# Altium footprint library LimeMicroAltiumLib.PcbLib: 876 footprints (part 43 of 57)
Each footprint in its own frame and in the unit in brackets; x right, y up, seen from the top. Pads: shape width x height; smd on the part's side, far side on the other; paste and mask are expansions set on the pad; w line width, h text height; cw(c..) or ccw(c..) is an arc to the next point about the centre after c.
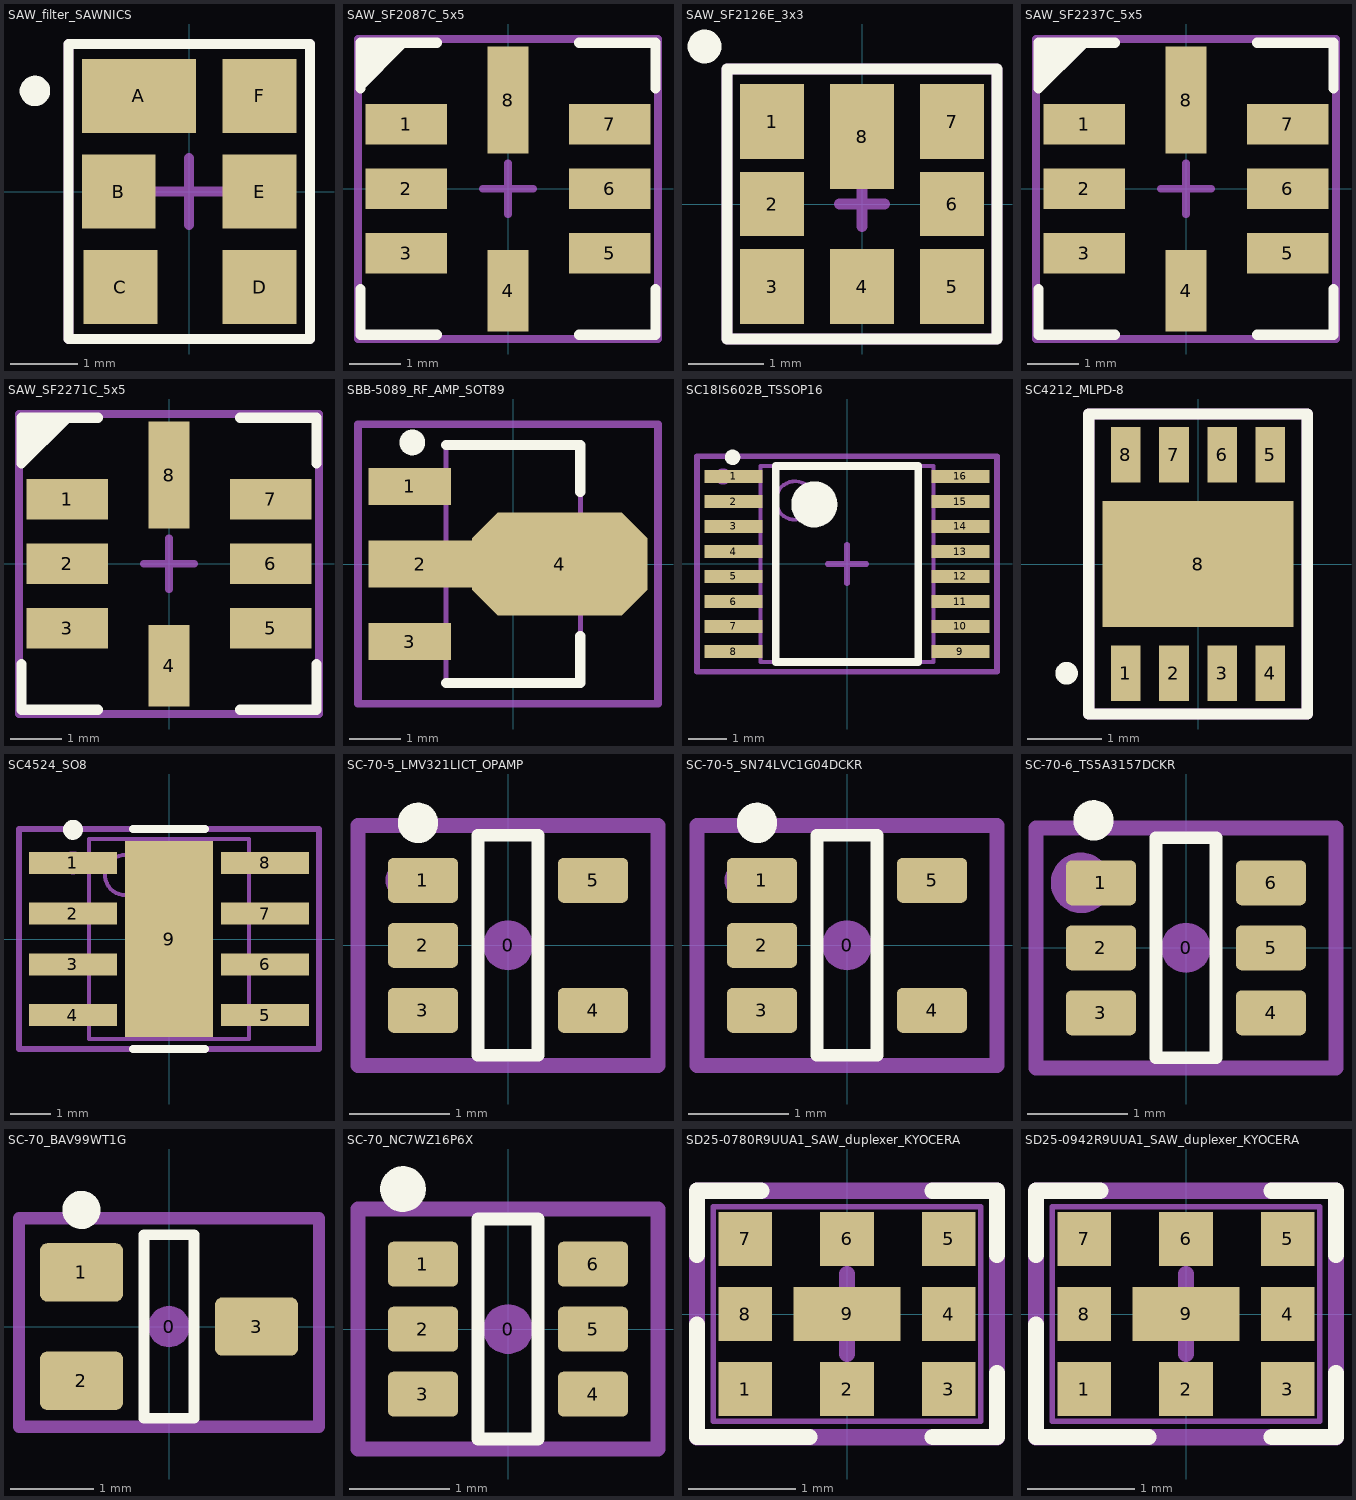
[diagram p42: the footprints below, top view; thin cyan lines are the x and y axes]

## SAW_filter_SAWNICS [mm]
pads (6):
  rect 1.7x1.1 smd: A(-0.75,1.425)
  rect 1.1x1.1 smd: B(-1.05,0) C(-1.025,-1.425) D(1.05,-1.425) E(1.05,0) F(1.05,1.425)
Top Overlay:
  circle w0.254: c-2.3,1.5 r0.1
  lines w0.15: -1.8,-2.2 1.8,-2.2 1.8,2.2 -1.8,2.2 -1.8,-2.2
Mechanical 15:
  circle w0.254: c-0.8,1.5 r0.1
  lines w0.15: -0.5,0 0,0 ; 0,-0.5 0,0 ; 0,0.5 0,0 ; 0.5,0 0,0 ; -1.8,-2.2 -1.8,2.2 1.8,2.2 1.8,-2.2 -1.8,-2.2
  text ".Designator" at 0,0 h0.55
3D body "SW3dPS-DCC6C.STEP": height 1.14, standoff -0.09, extent -1.475,-1.475 1.525,1.525

## SAW_SF2087C_5x5 [mm]
pads (8):
  rect 1.6x0.8 smd mask+0.05: 1(-2,1.27) 2(-2,0) 3(-2,-1.27) 5(2,-1.27) 6(2,0) 7(2,1.27)
  rect 0.8x1.6 smd mask+0.05: 4(0,-2.005)
  rect 0.8x2.1 smd mask+0.05: 8(0,1.745)
Top Overlay:
  region: -2.9,1.9 -2,2.8 -2,2.9 -2.87,2.9 -2.9,2.87
  lines w0.2: -2.9,-1.97 -2.9,-2.87 -1.4,-2.87 ; -2.9,1.97 -2.9,2.87 -1.4,2.87 ; 1.4,-2.87 2.9,-2.87 2.9,-1.97 ; 1.4,2.87 2.9,2.87 2.9,1.97
Mechanical 15:
  circle w0.25: c-2,1.3 r0.1
  lines w0.15: -0.5,0 0.5,0 ; 0,-0.5 0,0.5 ; -2.95,-2.955 2.95,-2.955 2.95,2.945 -2.95,2.945 -2.95,-2.955
  text ".Designator" at 0,0 h0.55
3D body "User Library-TA0731.step": height 1.7, standoff 0, extent -2.5,-2.5 2.5,2.5

## SAW_SF2126E_3x3 [mm]
pads (8):
  rect 0.85x1 smd mask+0.05: 1(-1.2,1.1) 3(-1.2,-1.1) 4(0,-1.1) 5(1.2,-1.1) 7(1.2,1.1)
  rect 0.85x0.85 smd mask+0.05: 2(-1.2,0) 6(1.2,0)
  rect 0.85x1.4 smd mask+0.05: 8(0,0.9)
Top Overlay:
  circle w0.25: c-2.1,2.1 r0.1
  lines w0.15: -1.8,-1.8 -1.8,1.8 1.8,1.8 1.8,-1.8 -1.8,-1.8
Mechanical 15:
  circle w0.25: c-1.2,1.1 r0.1
  lines w0.15: -0.3,0 0.3,0 ; 0,-0.3 0,0.3 ; -1.8,-1.8 1.8,-1.8 1.8,1.8 -1.8,1.8 -1.8,-1.8
  text ".Designator" at 0,0 h0.55
3D body: height 1.15, standoff 0, extent -1.298,0.901 -0.9,1.3
3D body: height 1.1, standoff 0, extent -1.5,-1.5 1.5,1.5

## SAW_SF2237C_5x5 [mm]
pads (8):
  rect 1.6x0.8 smd mask+0.05: 1(-2,1.27) 2(-2,0) 3(-2,-1.27) 5(2,-1.27) 6(2,0) 7(2,1.27)
  rect 0.8x1.6 smd mask+0.05: 4(0,-2.005)
  rect 0.8x2.1 smd mask+0.05: 8(0,1.745)
Top Overlay:
  region: -2.9,1.9 -2,2.8 -2,2.9 -2.87,2.9 -2.9,2.87
  lines w0.2: -2.9,-1.97 -2.9,-2.87 -1.4,-2.87 ; -2.035,2.835 -2.9,1.97 -2.9,2.87 -1.4,2.87 ; 1.4,-2.87 2.9,-2.87 2.9,-1.97 ; 1.4,2.87 2.9,2.87 2.9,1.97
Mechanical 15:
  circle w0.25: c-2,1.3 r0.1
  lines w0.15: -0.5,0 0.5,0 ; 0,-0.5 0,0.5 ; -2.95,-2.955 2.95,-2.955 2.95,2.945 -2.95,2.945 -2.95,-2.955
  text ".Designator" at 0,0 h0.55
3D body "User Library-TA0731.step": height 1.7, standoff 0, extent -2.5,-2.5 2.5,2.5

## SAW_SF2271C_5x5 [mm]
pads (8):
  rect 1.6x0.8 smd mask+0.05: 1(-2,1.27) 2(-2,0) 3(-2,-1.27) 5(2,-1.27) 6(2,0) 7(2,1.27)
  rect 0.8x1.6 smd mask+0.05: 4(0,-2.005)
  rect 0.8x2.1 smd mask+0.05: 8(0,1.745)
Top Overlay:
  region: -2.9,1.9 -2,2.8 -2,2.9 -2.87,2.9 -2.9,2.87
  lines w0.2: -2.9,-1.97 -2.9,-2.87 -1.4,-2.87 ; -2.035,2.835 -2.9,1.97 -2.9,2.87 -1.4,2.87 ; 1.4,-2.87 2.9,-2.87 2.9,-1.97 ; 1.4,2.87 2.9,2.87 2.9,1.97
Mechanical 15:
  circle w0.25: c-2,1.3 r0.1
  lines w0.15: -0.5,0 0.5,0 ; 0,-0.5 0,0.5 ; -2.95,-2.955 2.95,-2.955 2.95,2.945 -2.95,2.945 -2.95,-2.955
  text ".Designator" at 0,0 h0.55
3D body "User Library-TA0731.step": height 1.7, standoff 0, extent -2.5,-2.5 2.5,2.5

## SBB-5089_RF_AMP_SOT89 [mm]
pads (4):
  rect 1.6x0.711 smd: 1(-2,1.5) 3(-2,-1.5)
  rect 2x0.914 smd: 2(-1.8,0)
  oct 3.4x2 smd: 4(0.9,0)
Top Overlay:
  circle w0.25: c-1.95,2.35 r0.125
  lines w0.2: -1.3,-2.3 1.3,-2.3 1.3,-1.4 ; -1.3,2.3 1.3,2.3 1.3,1.4
Mechanical 13:
  lines w0.1: -1.3,-2.3 1.3,-2.3 1.3,2.3 -1.3,2.3 -1.3,-2.3
Mechanical 15:
  circle w0.15: c-2.125,1.5 r0.056
  lines w0.15: -0.5,0 0.5,0 ; 0,-0.5 0,0.5 ; -3,-2.7 2.8,-2.7 2.8,2.7 -3,2.7 -3,-2.7
  text ".Designator" at 0,0 h0.55
3D body "SW3dPS-SOT89.STEP": height 1.59, standoff -0.02, extent -2.408,-2.286 1.842,2.314

## SC18IS602B_TSSOP16 [mm]
pads (16):
  rect 1.5x0.35 smd mask+0.05: 1(-2.95,2.275) 2(-2.95,1.625) 3(-2.95,0.975) 4(-2.95,0.325) 5(-2.95,-0.325) 6(-2.95,-0.975) 7(-2.95,-1.625) 8(-2.95,-2.275) 9(2.95,-2.275) 10(2.95,-1.625) 11(2.95,-0.975) 12(2.95,-0.325) 13(2.95,0.325) 14(2.95,0.975) 15(2.95,1.625) 16(2.95,2.275)
Top Overlay:
  circle w0.6: c-0.85,1.55 r0.3
  circle w0.25: c-2.975,2.775 r0.075
  lines w0.2: -1.85,-2.55 1.85,-2.55 1.85,2.55 -1.85,2.55 -1.85,-2.55
Mechanical 13:
  circle w0.1: c-1.35,1.65 r0.5
  lines w0.1: -2.25,-2.55 2.25,-2.55 2.25,2.55 -2.25,2.55 -2.25,-2.55
Mechanical 15:
  circle w0.35: c-3.225,2.275 r0.035
  lines w0.15: -0.5,0 0.5,0 ; 0,-0.5 0,0.5 ; -3.9,-2.8 3.9,-2.8 3.9,2.8 -3.9,2.8 -3.9,-2.8
  text ".Designator" at 0,0 h0.55
3D body "User Library-TSSOP-16-1.step": height 1.1, standoff 0, extent -3.2,-2.5 3.2,2.5

## SC4212_MLPD-8 [mm] "SC4212"
height 1.5
pads (9):
  rect 0.4x0.75 smd mask+0.05: 1(-0.975,-1.475) 2(-0.325,-1.475) 3(0.325,-1.475) 4(0.975,-1.475) 5(0.975,1.475) 6(0.325,1.475) 7(-0.325,1.475) 8(-0.975,1.475)
  rect 2.58x1.7 smd mask+0.05: 8(0,0)
Top Overlay:
  circle w0.254: c-1.775,-1.475 r0.025
  lines w0.15: -1.475,-2.025 1.475,-2.025 1.475,2.025 -1.475,2.025 -1.475,-2.025
Mechanical 15:
  circle w0.254: c-0.975,-1.475 r0.025
  lines w0.15: -0.45,0 0,0 ; 0,-0.45 0,0 ; 0,0.45 0,0 ; 0.45,0 0,0 ; -1.475,-2.025 1.475,-2.025 1.475,2.025 -1.475,2.025 -1.475,-2.025
  text ".Designator" at 0,0 h0.55
3D body: height 1, standoff 0, extent -1.5,-1.6 1.5,1.7
3D body: height 1.01, standoff 0, extent -1.2,-1.4 -0.8,-1

## SC4524_SO8 [mm] "SOIC, 8-Leads, Body 4,90x3,90mm, Pitch 1,27mm, IPC Medium Density"
height 1.7
pads (9):
  rect 2.2x0.55 smd mask+0.05: 1(-2.4,1.905) 2(-2.4,0.635) 3(-2.4,-0.635) 4(-2.4,-1.905) 5(2.4,-1.905) 6(2.4,-0.635) 7(2.4,0.635) 8(2.4,1.905)
  rect 2.2x4.9 smd mask+0.05: 9(0,0)
Top Overlay:
  circle w0.25: c-2.4,2.73 r0.125
  lines w0.2: -0.9,-2.75 0.9,-2.75 ; -0.9,2.75 0.9,2.75
Mechanical 13:
  circle w0.1: c-1.1,1.6 r0.5
  lines w0.1: -2,-2.5 2,-2.5 2,2.5 -2,2.5 -2,-2.5
Mechanical 15:
  circle w0.35: c-2.4,1.905 r0.112
  lines w0.15: -0.5,0 0.5,0 ; 0,-0.5 0,0.5 ; -3.75,-2.75 3.75,-2.75 3.75,2.75 -3.75,2.75 -3.75,-2.75
  text ".Designator" at 0,-0.1 h0.55
3D body "CircuitWorks-SO-8.step": height 1.45, standoff 0, extent -2.9,-2.402 2.878,2.5

## SC-70-5_LMV321LICT_OPAMP [mm] "SC-70 (SOT323), 5 pin"
height 1.003
pads (6):
  round 0.5 on Mech15: 0(0,0)
  rrect25% 0.7x0.45 smd: 1(-0.85,0.65) 2(-0.85,0) 3(-0.85,-0.65) 4(0.85,-0.65) 5(0.85,0.65)
Top Overlay:
  circle w0.2: c-0.9,1.225 r0.102
  lines w0.127: -0.3,-1.1 -0.3,1.1 0.3,1.1 0.3,-1.1 -0.3,-1.1
Top Solder:
  region: -1.3,-0.975 -1.3,0.975 -0.4,0.975 -0.4,-0.975
Mechanical 15:
  circle w0.2: c-1.05,0.65 r0.075
  lines w0.15: -1.5,-1.2 -1.5,1.2 1.5,1.2 1.5,-1.2 -1.5,-1.2
  text ".Designator" at 0,0 h0.55
3D body "User Library-SC70-6.step": height 0.92, standoff -0.03, extent -1.05,-1 1.05,1

## SC-70-5_SN74LVC1G04DCKR [mm] "SC-70 (SOT323), 5 pin"
height 1.003
pads (6):
  round 0.5 on Mech15: 0(0,0)
  rrect25% 0.7x0.45 smd: 1(-0.85,0.65) 2(-0.85,0) 3(-0.85,-0.65) 4(0.85,-0.65) 5(0.85,0.65)
Top Overlay:
  circle w0.2: c-0.9,1.225 r0.102
  lines w0.127: -0.3,-1.1 -0.3,1.1 0.3,1.1 0.3,-1.1 -0.3,-1.1
Top Solder:
  region: -1.3,-0.975 -1.3,0.975 -0.4,0.975 -0.4,-0.975
Mechanical 15:
  circle w0.2: c-1.05,0.65 r0.075
  lines w0.15: -1.5,-1.2 -1.5,1.2 1.5,1.2 1.5,-1.2 -1.5,-1.2
  text ".Designator" at 0,0 h0.55
3D body "User Library-SC70-6.step": height 0.92, standoff -0.03, extent -1.05,-1 1.05,1

## SC-70-6_TS5A3157DCKR [mm] "SC-70 (SOT323), 6 pin"
height 1.003
pads (7):
  round 0.5 on Mech15: 0(0,0)
  rrect25% 0.7x0.45 smd: 1(-0.85,0.65) 2(-0.85,0) 3(-0.85,-0.65) 4(0.85,-0.65) 5(0.85,0) 6(0.85,0.65)
Top Overlay:
  circle w0.2: c-0.925,1.275 r0.102
  lines w0.127: -0.3,-1.1 0.3,-1.1 0.3,1.1 -0.3,1.1 -0.3,-1.1
Top Solder:
  region: 1.3,-0.975 0.4,-0.975 0.4,0.975 1.3,0.975
  region: -1.3,-0.975 -0.4,-0.975 -0.4,0.975 -1.3,0.975
  region: -1.3,-0.975
Mechanical 15:
  circle w0.35: c-1.05,0.65 r0.127
  lines w0.15: -1.5,-1.2 1.5,-1.2 1.5,1.2 -1.5,1.2 -1.5,-1.2
  text ".Designator" at 0,0 h0.55
3D body "User Library-SC70-6.step": height 0.92, standoff -0.03, extent -1.05,-1 1.05,1

## SC-70_BAV99WT1G [mm] "SC-70 (SOT323), 3 pin"
height 1.003
pads (4):
  round 0.5 on Mech15: 0(0,0)
  rrect25% 1x0.7 smd: 1(-1.05,0.65) 2(-1.05,-0.65) 3(1.05,0)
Top Overlay:
  circle w0.254: c-1.05,1.4 r0.102
  lines w0.127: -0.3,-1.1 0.3,-1.1 0.3,1.1 -0.3,1.1 -0.3,-1.1
Mechanical 15:
  circle w0.2: c-1.05,0.65 r0.05
  lines w0.15: -1.8,-1.2 1.8,-1.2 1.8,1.3 -1.8,1.3 -1.8,-1.2
  text ".Designator" at 0,0 h0.55
3D body "User Library-sc70-3.step": height 0.99, standoff -0.01, extent -1.15,-1.05 1.15,1.05

## SC-70_NC7WZ16P6X [mm] "SC-70 (SOT323), 6 pin"
height 1.003
pads (7):
  round 0.5 on Mech15: 0(0,0)
  rrect25% 0.7x0.45 smd: 1(-0.85,0.65) 2(-0.85,0) 3(-0.85,-0.65) 4(0.85,-0.65) 5(0.85,0) 6(0.85,0.65)
Top Overlay:
  circle w0.254: c-1.05,1.4 r0.102
  lines w0.127: -0.3,-1.1 0.3,-1.1 0.3,1.1 -0.3,1.1 -0.3,-1.1
Top Solder:
  region: 1.3,-0.975 1.3,0.975 0.4,0.975 0.4,-0.975
  region: -1.3,-0.975 -1.3,0.975 -0.4,0.975 -0.4,-0.975
Mechanical 15:
  circle w0.2: c-1.05,0.65 r0.05
  lines w0.15: -1.5,-1.2 1.5,-1.2 1.5,1.2 -1.5,1.2 -1.5,-1.2
  text ".Designator" at 0,0 h0.55
3D body "User Library-SC70-6.step": height 0.92, standoff -0.03, extent -1.05,-1 1.05,1

## SD25-0780R9UUA1_SAW_duplexer_KYOCERA [mm] "RF Duplexer 703MHz ~ 748MHz / 758MHz ~ 803MHz 9-SMD, No Lead"
pads (9):
  rect 0.5x0.5 smd mask+0.05: 1(-0.95,-0.7) 2(0,-0.7) 3(0.95,-0.7) 4(0.95,0) 5(0.95,0.7) 6(0,0.7) 7(-0.95,0.7) 8(-0.95,0)
  rect 1x0.5 smd mask+0.05: 9(0,0)
Top Overlay:
  lines w0.15: -1.4,-0.1 -1.4,-1.15 -0.35,-1.15 ; -1.4,0.55 -1.4,1.15 -0.8,1.15 ; 0.8,-1.15 1.4,-1.15 1.4,-0.55 ; 0.8,1.15 1.4,1.15 1.4,0.55
Mechanical 13:
  region: 0.45,0.2 0.45,-0.2 -0.45,-0.2 -0.45,0.2
  region: -0.75,0.2 -0.75,-0.2 -1.15,-0.2 -1.15,0.2
  region: -1.15,-0.5 -1.15,-0.9 -0.75,-0.9 -0.75,-0.5
  region: -0.2,-0.5 -0.2,-0.9 0.2,-0.9 0.2,-0.5
  region: 0.75,-0.5 0.75,-0.9 1.15,-0.9 1.15,-0.5
  region: 0.75,0.2 0.75,-0.2 1.15,-0.2 1.15,0.2
  region: 0.75,0.9 0.75,0.5 1.15,0.5 1.15,0.9
  region: -0.2,0.9 -0.2,0.5 0.2,0.5 0.2,0.9
  region: -1.15,0.9 -1.15,0.5 -0.75,0.5 -0.75,0.9
  lines w0.05: -1.25,-1 1.25,-1 1.25,1 -1.25,1 -1.25,-1
  text "7" at -0.675,0.6 h0.2
  text "5" at 0.525,0.6 h0.2
  text "3" at 0.525,-0.8 h0.2
  text "1" at -0.625,-0.8 h0.2
Mechanical 15:
  circle w0.2: c-0.925,-0.65 r0.035
  lines w0.15: -0.375,0 0,0 ; 0,-0.375 0,0 ; 0,0.375 0,0 ; 0.375,0 0,0 ; -1.4,-1.15 1.4,-1.15 1.4,1.15 -1.4,1.15 -1.4,-1.15
  text ".Designator" at 0,0 h0.55
3D body: height 0.9, standoff 0, extent -1.25,-1 1.25,1

## SD25-0942R9UUA1_SAW_duplexer_KYOCERA [mm] "RF Duplexer 880MHz ~ 915MHz / 925MHz ~ 960MHz 9-SMD, No Lead"
pads (9):
  rect 0.5x0.5 smd mask+0.05: 1(-0.95,-0.7) 2(0,-0.7) 3(0.95,-0.7) 4(0.95,0) 5(0.95,0.7) 6(0,0.7) 7(-0.95,0.7) 8(-0.95,0)
  rect 1x0.5 smd mask+0.05: 9(0,0)
Top Overlay:
  lines w0.15: -1.4,-0.1 -1.4,-1.15 -0.35,-1.15 ; -1.4,0.55 -1.4,1.15 -0.8,1.15 ; 0.8,-1.15 1.4,-1.15 1.4,-0.55 ; 0.8,1.15 1.4,1.15 1.4,0.55
Mechanical 13:
  region: -1.15,0.9 -1.15,0.5 -0.75,0.5 -0.75,0.9
  region: -0.2,0.9 -0.2,0.5 0.2,0.5 0.2,0.9
  region: 0.75,0.9 0.75,0.5 1.15,0.5 1.15,0.9
  region: 0.75,0.2 0.75,-0.2 1.15,-0.2 1.15,0.2
  region: 0.75,-0.5 0.75,-0.9 1.15,-0.9 1.15,-0.5
  region: -0.2,-0.5 -0.2,-0.9 0.2,-0.9 0.2,-0.5
  region: -1.15,-0.5 -1.15,-0.9 -0.75,-0.9 -0.75,-0.5
  region: -0.75,0.2 -0.75,-0.2 -1.15,-0.2 -1.15,0.2
  region: 0.45,0.2 0.45,-0.2 -0.45,-0.2 -0.45,0.2
  lines w0.05: -1.25,-1 -1.25,1 1.25,1 1.25,-1 -1.25,-1
  text "1" at -0.625,-0.8 h0.2
  text "3" at 0.525,-0.8 h0.2
  text "5" at 0.525,0.6 h0.2
  text "7" at -0.675,0.6 h0.2
Mechanical 15:
  circle w0.2: c-0.925,-0.65 r0.035
  lines w0.15: -0.375,0 0,0 ; 0,-0.375 0,0 ; 0,0.375 0,0 ; 0.375,0 0,0 ; -1.4,-1.15 -1.4,1.15 1.4,1.15 1.4,-1.15 -1.4,-1.15
  text ".Designator" at 0,0 h0.55
3D body: height 0.9, standoff 0, extent -1.25,-1 1.25,1